# Altium footprint library SamacSys.PcbLib: 1008 footprints (part 19 of 63)
Each footprint in its own frame and in the unit in brackets; x right, y up, seen from the top. Pads: shape width x height; smd on the part's side, far side on the other; paste and mask are expansions set on the pad; w line width, h text height; cw(c..) or ccw(c..) is an arc to the next point about the centre after c.
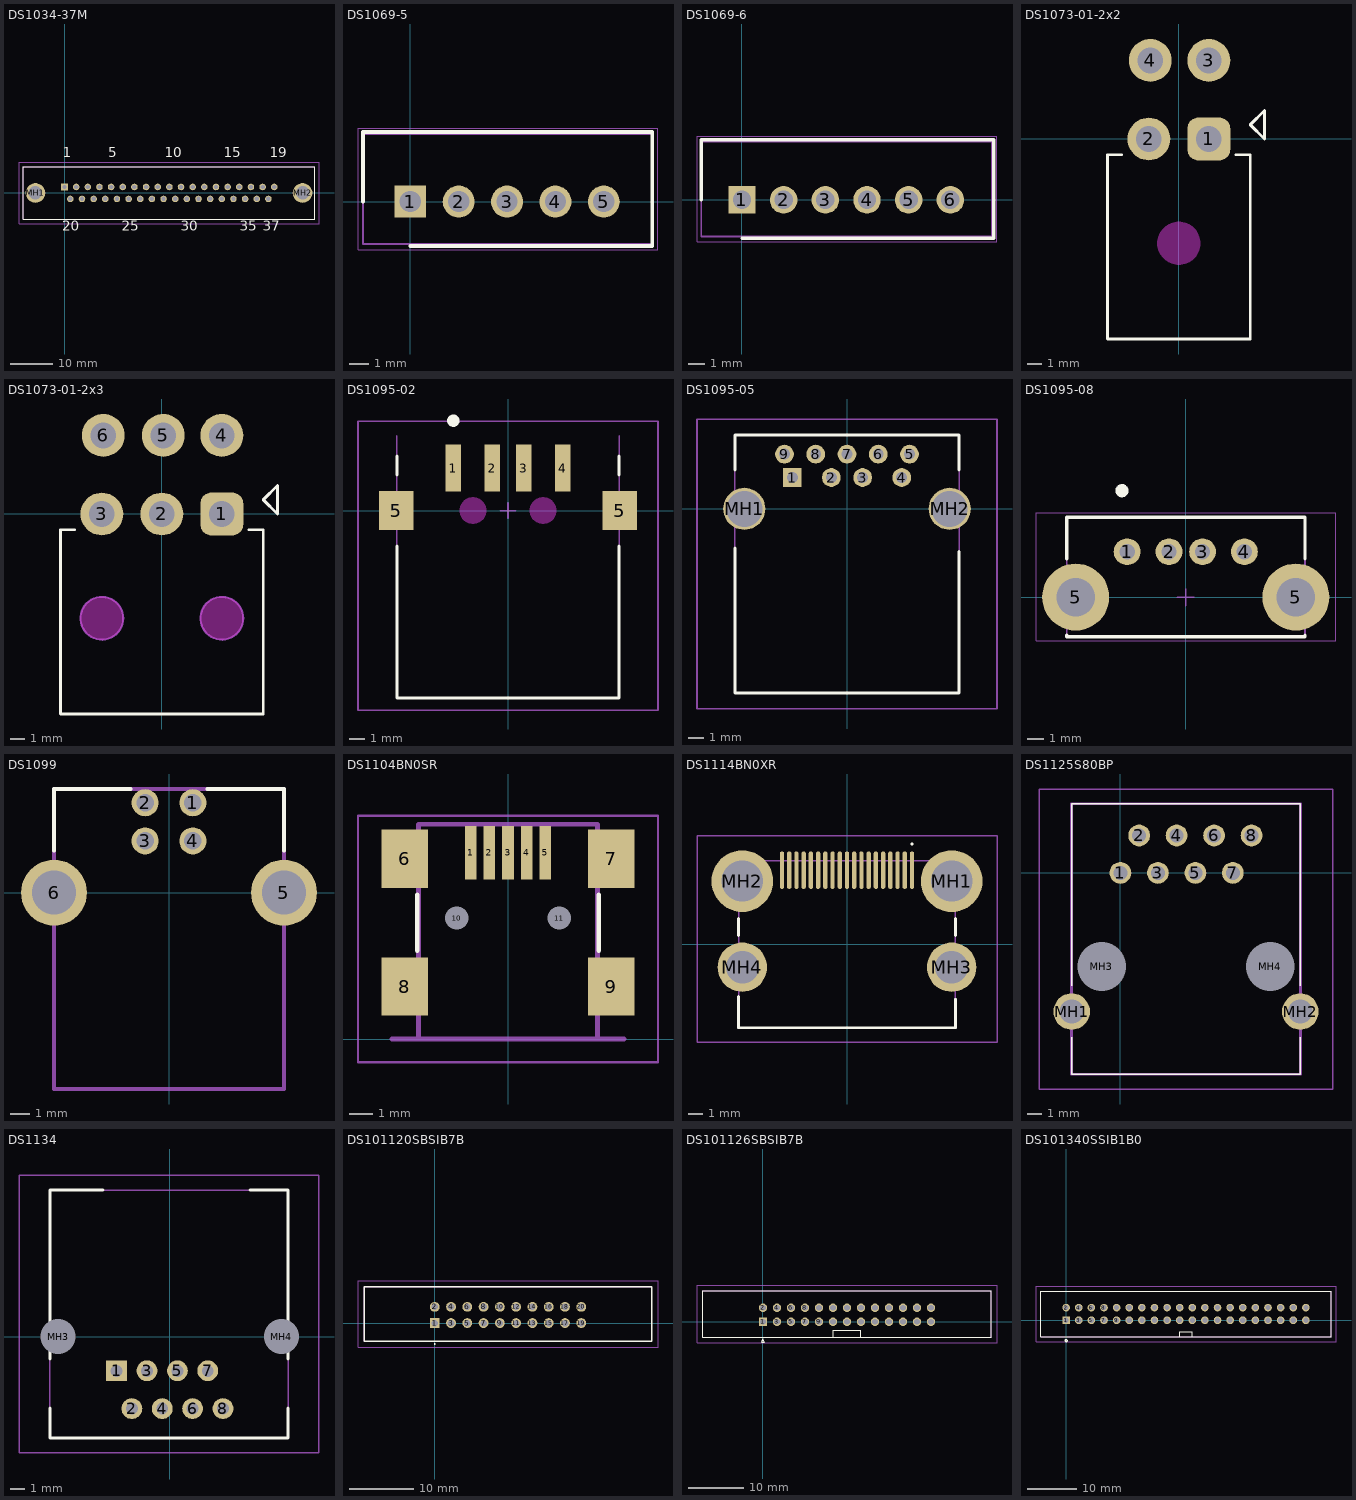
[diagram p18: the footprints below, top view; thin cyan lines are the x and y axes]

## DS1034-37M [mm]
pads (39):
  rect 1.56x1.56 hole 1.04: 1(0,1.425)
  round 1.56 hole 1.04: 2(2.77,1.425) 3(5.54,1.425) 4(8.31,1.425) 5(11.08,1.425) 6(13.85,1.425) 7(16.62,1.425) 8(19.39,1.425) 9(22.16,1.425) 10(24.93,1.425) 11(27.7,1.425) 12(30.47,1.425) 13(33.24,1.425) 14(36.01,1.425) 15(38.78,1.425) 16(41.55,1.425) 17(44.32,1.425) 18(47.09,1.425) 19(49.86,1.425) 20(1.385,-1.415) 21(4.155,-1.415) 22(6.925,-1.415) 23(9.695,-1.415) 24(12.465,-1.415) 25(15.235,-1.415) 26(18.005,-1.415) 27(20.775,-1.415) 28(23.545,-1.415) 29(26.315,-1.415) 30(29.085,-1.415) 31(31.855,-1.415) 32(34.625,-1.415) 33(37.395,-1.415) 34(40.165,-1.415) 35(42.935,-1.415) 36(45.705,-1.415) 37(48.475,-1.415)
  round 4.68 hole 3.2: MH1(-6.91,0.005) MH2(56.59,0.005)
Top Overlay:
  lines w0.2: -9.82,-6.27 -9.82,6.28 59.5,6.28 59.5,-6.27 -9.82,-6.27
  text "35" at 41.696,-9.804 h4
  text "30" at 27.602,-9.804 h4
  text "25" at 13.606,-9.804 h4
  text "20" at -0.489,-9.804 h4
  text "37" at 47.102,-9.804 h4
  text "19" at 48.791,7.696 h4
  text "15" at 37.883,7.696 h4
  text "10" at 23.789,7.696 h4
  text "5" at 10.441,7.696 h4
  text "1" at -0.372,7.696 h4
Assembly:
  lines w0.2: -9.82,-6.27 59.5,-6.27 59.5,6.28 -9.82,6.28 -9.82,-6.27
Countryard:
  lines w0.1: -10.82,-7.27 60.5,-7.27 60.5,7.28 -10.82,7.28 -10.82,-7.27
3D body "5787686-1.stp": height 12.46, standoff -3.44, extent -9.856,-6.294 59.536,6.304

## DS1069-5 [mm]
pads (5):
  rect 1.65x1.65 hole 1.1: 1(0,0)
  round 1.65 hole 1.1: 2(2.5,0) 3(5,0) 4(7.5,0) 5(10,0)
Top Overlay:
  lines w0.2: -2.45,0 -2.45,3.6 12.5,3.6 12.5,-2.3 0,-2.3
Assembly:
  lines w0.1: -2.45,-2.2 -2.45,3.5 12.5,3.5 12.5,-2.2 -2.45,-2.2
Countryard:
  lines w0.05: -2.7,-2.5 -2.7,3.8 12.8,3.8 12.8,-2.5 -2.7,-2.5
3D body "DS1069-5 CWF-5.stp": height 7, standoff -3.5, extent -2.5,-2.2 12.5,3.55

## DS1069-6 [mm]
pads (6):
  rect 1.65x1.65 hole 1.1: 1(0,0)
  round 1.65 hole 1.1: 2(2.5,0) 3(5,0) 4(7.5,0) 5(10,0) 6(12.5,0)
Top Overlay:
  lines w0.2: -2.45,0 -2.45,3.6 15.1,3.6 15.1,-2.3 0,-2.3
Assembly:
  lines w0.1: -2.45,-2.2 15,-2.2 15,3.5 -2.45,3.5 -2.45,-2.2
Countryard:
  lines w0.05: -2.7,-2.5 15.3,-2.5 15.3,3.8 -2.7,3.8 -2.7,-2.5
3D body "DS1069-6 CWF-6.stp": height 7, standoff -3.5, extent -2.5,-2.2 15,3.55

## DS1073-01-2x2 [mm] "Molex Mini-FIT, P=4.2mm"
pads (4):
  rrect50% 3x3 hole 1.8: 1(2.1,0)
  round 3 hole 1.8: 2(-2.1,0) 3(2.1,5.5) 4(-2,5.5)
Top Overlay:
  lines w0.2: -4,-1.1 -5,-1.1 -5,-14 5,-14 5,-1.1 4,-1.1 ; 5,1 6,0 6,2 5,1
Keep-Out Layer:
  board cut-out: -1.5,-7.3 -1.5,-7.448 -1.442,-7.738 -1.329,-8.011 -1.165,-8.256 -0.956,-8.465 -0.711,-8.629 -0.438,-8.742 -0.148,-8.8 0,-8.8 0.148,-8.8 0.438,-8.742 0.711,-8.629 0.956,-8.465 1.165,-8.256 1.329,-8.011 1.442,-7.738 1.5,-7.448 1.5,-7.3 1.5,-7.152 1.442,-6.862 1.329,-6.589 1.165,-6.344 0.956,-6.135 0.711,-5.971 0.438,-5.858 0.148,-5.8 0,-5.8 -0.148,-5.8 -0.438,-5.858 -0.711,-5.971 -0.956,-6.135 -1.165,-6.344 -1.329,-6.589 -1.442,-6.862 -1.5,-7.152
3D body "2206030104.stp": height 11.15, standoff -3.8, extent -4.804,-13.9 4.804,6.054

## DS1073-01-2x3 [mm] "Molex Mini-FIT, P=4.2mm"
pads (6):
  rrect50% 3x3 hole 1.8: 1(4.2,0)
  round 3 hole 1.8: 2(0,0) 3(-4.2,0) 4(4.2,5.5) 5(0.1,5.5) 6(-4.1,5.5)
Top Overlay:
  lines w0.2: -6.1,-1.1 -7.1,-1.1 -7.1,-14 7.1,-14 7.1,-1.1 6.1,-1.1 ; 7.1,1 8.1,0 8.1,2 7.1,1
Keep-Out Layer:
  board cut-out: -5.7,-7.3 -5.7,-7.448 -5.642,-7.738 -5.529,-8.011 -5.365,-8.256 -5.156,-8.465 -4.911,-8.629 -4.638,-8.742 -4.348,-8.8 -4.2,-8.8 -4.052,-8.8 -3.762,-8.742 -3.489,-8.629 -3.244,-8.465 -3.035,-8.256 -2.871,-8.011 -2.758,-7.738 -2.7,-7.448 -2.7,-7.3 -2.7,-7.152 -2.758,-6.862 -2.871,-6.589 -3.035,-6.344 -3.244,-6.135 -3.489,-5.971 -3.762,-5.858 -4.052,-5.8 -4.2,-5.8 -4.348,-5.8 -4.638,-5.858 -4.911,-5.971 -5.156,-6.135 -5.365,-6.344 -5.529,-6.589 -5.642,-6.862 -5.7,-7.152
  board cut-out: 2.7,-7.3 2.7,-7.448 2.758,-7.738 2.871,-8.011 3.035,-8.256 3.244,-8.465 3.489,-8.629 3.762,-8.742 4.052,-8.8 4.2,-8.8 4.348,-8.8 4.638,-8.742 4.911,-8.629 5.156,-8.465 5.365,-8.256 5.529,-8.011 5.642,-7.738 5.7,-7.448 5.7,-7.3 5.7,-7.152 5.642,-6.862 5.529,-6.589 5.365,-6.344 5.156,-6.135 4.911,-5.971 4.638,-5.858 4.348,-5.8 4.2,-5.8 4.052,-5.8 3.762,-5.858 3.489,-5.971 3.244,-6.135 3.035,-6.344 2.871,-6.589 2.758,-6.862 2.7,-7.152
Top Assembly:
  circle w0.15: c4.2,-7.3 r1.5
  circle w0.15: c-4.2,-7.3 r1.5
3D body "2206030106.stp": height 11.15, standoff -3.8, extent -6.904,-13.9 6.904,6.054

## DS1095-02 [mm]
height 7.1
pads (6):
  rect 1x3 smd: 1(-3.5,2.71) 2(-1,2.71) 3(1,2.71) 4(3.5,2.71)
  rect 2.2x2.5 smd: 5(-7.15,0) 5(7.15,0)
Top Overlay:
  circle w0.4: c-3.5,5.75 r0.193
  lines w0.2: -7.112,-2.261 -7.112,-12 7.112,-12 7.112,-2.261 ; -7.112,2.286 -7.112,3.5 ; 7.112,2.286 7.112,3.5
Keep-Out Layer:
  board cut-out: -2.25,-0.85 -2.334,-0.85 -2.498,-0.817 -2.653,-0.753 -2.792,-0.66 -2.91,-0.542 -3.003,-0.403 -3.067,-0.248 -3.1,-0.084 -3.1,0 -3.1,0.084 -3.067,0.248 -3.003,0.403 -2.91,0.542 -2.792,0.66 -2.653,0.753 -2.498,0.817 -2.334,0.85 -2.25,0.85 -2.166,0.85 -2.002,0.817 -1.847,0.753 -1.708,0.66 -1.59,0.542 -1.497,0.403 -1.433,0.248 -1.4,0.084 -1.4,0 -1.4,-0.084 -1.433,-0.248 -1.497,-0.403 -1.59,-0.542 -1.708,-0.66 -1.847,-0.753 -2.002,-0.817 -2.166,-0.85
  board cut-out: 2.25,0.85 2.334,0.85 2.498,0.817 2.653,0.753 2.792,0.66 2.91,0.542 3.003,0.403 3.067,0.248 3.1,0.084 3.1,0 3.1,-0.084 3.067,-0.248 3.003,-0.403 2.91,-0.542 2.792,-0.66 2.653,-0.753 2.498,-0.817 2.334,-0.85 2.25,-0.85 2.166,-0.85 2.002,-0.817 1.847,-0.753 1.708,-0.66 1.59,-0.542 1.497,-0.403 1.433,-0.248 1.4,-0.084 1.4,0 1.4,0.084 1.433,0.248 1.497,0.403 1.59,0.542 1.708,0.66 1.847,0.753 2.002,0.817 2.166,0.85
Assembly:
  lines w0.1: -7.112,4.775 -7.112,-12 7.112,-12 7.112,4.775
Countryard:
  lines w0.1: -0.5,0 0.5,0 ; 0,-0.5 0,0.5 ; -9.595,-12.78 -9.595,5.72 9.595,5.72 9.595,-12.78 -9.595,-12.78

## DS1095-05 [mm]
height 7.1
pads (11):
  rect 1.2x1.2 hole 0.7: 1(-3.5,2)
  round 1.2 hole 0.7: 2(-1,2) 3(1,2) 4(3.5,2) 5(4,3.5) 6(2,3.5) 7(0,3.5) 8(-2,3.5) 9(-4,3.5)
  round 2.7 hole 2.3: MH1(-6.57,0) MH2(6.57,0)
Top Overlay:
  lines w0.2: -7.175,-2.5 -7.175,-11.78 7.175,-11.78 7.175,-2.75 ; -7.175,2.5 -7.175,4.72 7.175,4.72 7.175,2.5
Assembly:
  lines w0.1: -7.175,-11.78 7.175,-11.78 7.175,4.72 -7.175,4.72 -7.175,-11.78
Countryard:
  lines w0.1: -9.595,-12.78 9.595,-12.78 9.595,5.72 -9.595,5.72 -9.595,-12.78
3D body "484050003.stp": height 7.57, standoff -4.04, extent -7.8,-11.8 7.8,4.7

## DS1095-08 [mm] "USB 2.0 Vertical"
height 13.7
pads (6):
  round 1.6 hole 0.92: 1(-3.5,2.71) 2(-1,2.71) 3(1,2.71) 4(3.5,2.71)
  round 4 hole 2.3: 5(-6.57,0) 5(6.57,0)
Top Overlay:
  circle w0.4: c-3.81,6.35 r0.193
  lines w0.2: -7.112,-2.261 -7.112,-2.362 7.112,-2.362 7.112,-2.261 ; -7.112,2.286 -7.112,4.775 7.112,4.775 7.112,2.286
Assembly:
  lines w0.1: -7.112,-2.362 -7.112,4.775 7.112,4.775 7.112,-2.362 -7.112,-2.362
Countryard:
  lines w0.05: -8.941,-2.591 8.966,-2.591 8.966,5.029 -8.941,5.029 -8.941,-2.591
  lines w0.1: -0.5,0 0.5,0 ; 0,-0.5 0,0.5
3D body "usb1040-xx-l-b_revb.step": height 13.75, standoff -3.45, extent -7.798,-2.341 7.802,4.779

## DS1099 [mm] "USB Type B"
height 11
pads (6):
  round 1.42 hole 0.92: 1(1.25,4.71) 2(-1.25,4.71) 3(-1.25,2.71) 4(1.25,2.71)
  round 3.45 hole 2.3: 5(6.02,0) 6(-6.02,0)
Top Overlay:
  lines w0.2: -6.02,2.2 -6.02,5.43 -2,5.43 ; 2,5.43 6.02,5.43 6.02,2.2
Assembly:
  lines w0.2: -6.02,-10.28 6.02,-10.28 6.02,5.43 -6.02,5.43 -6.02,-10.28
3D body "292304-1.stp": height 11.53, standoff -3.89, extent -7.195,-10.27 7.195,5.43

## DS1104BN0SR [mm]
pads (11):
  rect 0.5x2.3 smd: 1(-1.6,8) 2(-0.8,8) 3(0,8) 4(0.8,8) 5(1.6,8)
  rect 2x2.5 smd: 6(-4.45,7.75) 7(4.45,7.75) 8(-4.45,2.25) 9(4.45,2.25)
  round 0.5 hole 1 unplated: 10(-2.2,5.2) 11(2.2,5.2)
Top Overlay:
  lines w0.2: -3.9,3.8 -3.9,6.2 ; 3.9,3.8 3.9,6.2
Assembly:
  lines w0.2: -5,0 5,0 ; -3.85,0 -3.85,9.23 3.85,9.23 3.85,0
  text "PCB_Edge" at -4.367,-2.5 h3
Countryard:
  lines w0.1: -6.45,-1 -6.45,9.6 6.45,9.6 6.45,-1 -6.45,-1
3D body "DS1104-BN0SRS.stp": height 3.95, standoff -0.52, extent -4.65,-0.7 4.65,8.5

## DS1114BN0XR [mm]
pads (23):
  rrect100% 0.3x2.6 smd: 1(4.5,5.135) 2(4,5.135) 3(3.5,5.135) 4(3,5.135) 5(2.5,5.135) 6(2,5.135) 7(1.5,5.135) 8(1,5.135) 9(0.5,5.135) 10(0,5.135) 11(-0.5,5.135) 12(-1,5.135) 13(-1.5,5.135) 14(-2,5.135) 15(-2.5,5.135) 16(-3,5.135) 17(-3.5,5.135) 18(-4,5.135) 19(-4.5,5.135)
  round 4.275 hole 2.85: MH1(7.25,4.375) MH2(-7.25,4.375)
  round 3.42 hole 2.28: MH3(7.25,-1.585) MH4(-7.25,-1.585)
Top Overlay:
  lines w0.1: 4.5,6.9 cw(c4.5,6.95) 4.5,7 cw(c4.5,6.95) 4.5,6.9
  lines w0.2: -7.5,-3.6 -7.5,-5.775 7.5,-5.775 7.5,-3.8 ; -7.5,0.6 -7.5,1.8 ; 7.5,0.6 7.5,1.8
Assembly:
  lines w0.1: -7.5,-5.775 -7.5,5.775 7.5,5.775 7.5,-5.775 -7.5,-5.775
Countryard:
  lines w0.1: -10.387,-6.775 -10.387,7.513 ; -10.387,-6.775 10.387,-6.775 ; -10.387,-6.775 -10.387,7.513 ; -10.387,-6.775 10.387,-6.775 ; -10.387,7.513 10.387,7.513 ; -10.387,7.513 10.387,7.513 ; 10.387,-6.775 10.387,7.513 ; 10.387,-6.775 10.387,7.513
3D body "c-1747981-1-l-3d.stp": height 6.18, standoff -2.1, extent -7.5,-5.7 7.5,6.3

## DS1125S80BP [mm]
pads (12):
  round 1.478 hole 0.95: 1(0,0) 2(1.27,2.54) 3(2.54,0) 4(3.81,2.54) 5(5.08,0) 6(6.35,2.54) 7(7.62,0) 8(8.89,2.54)
  round 2.475 hole 1.65: MH1(-3.305,-9.4) MH2(12.195,-9.4)
  round 1.65 hole 3.3 unplated: MH3(-1.27,-6.35) MH4(10.16,-6.35)
Top Overlay:
  lines w0.1: -3.305,-11.15 -3.305,-13.65 12.195,-13.65 12.195,-11.15 ; -3.305,-7.65 -3.305,4.69 12.195,4.69 12.195,-7.65
Assembly:
  lines w0.2: -3.305,-13.65 12.195,-13.65 12.195,4.69 -3.305,4.69 -3.305,-13.65
Countryard:
  lines w0.1: -5.505,-14.65 14.395,-14.65 14.395,5.69 -5.505,5.69 -5.505,-14.65
3D body "DS1125-S80BP.stp": height 12.68, standoff -5, extent -4.024,-13.65 12.92,4.69

## DS1134 [mm] "TJ8P8C (DS1134)"
pads (10):
  rect 1.4x1.4 hole 0.8: 1(-3.57,-2.3)
  round 1.4 hole 0.8: 2(-2.55,-4.84) 3(-1.53,-2.3) 4(-0.51,-4.84) 5(0.51,-2.3) 6(1.53,-4.84) 7(2.55,-2.3) 8(3.57,-4.84)
  round 1.585 hole 2.36 unplated: MH3(-7.5,0) MH4(7.5,0)
Top Overlay:
  lines w0.2: -8.055,-4.8 -8.055,-6.81 7.945,-6.81 7.945,-4.8 ; -8.055,-1.5 -8.055,9.84 -4.5,9.84 ; 5.4,9.84 7.945,9.84 7.945,-1.5
Assembly:
  lines w0.1: -8.055,-6.81 -8.055,9.84 7.945,9.84 7.945,-6.81 -8.055,-6.81
Countryard:
  lines w0.1: -10.13,-7.81 -10.13,10.84 10.02,10.84 10.02,-7.81 -10.13,-7.81

## DS101120SBSIB7B [mm]
pads (20):
  rect 1.53x1.53 hole 1.02: 1(0,0)
  round 1.53 hole 1.02: 2(0,2.54) 3(2.54,0) 4(2.54,2.54) 5(5.08,0) 6(5.08,2.54) 7(7.62,0) 8(7.62,2.54) 9(10.16,0) 10(10.16,2.54) 11(12.7,0) 12(12.7,2.54) 13(15.24,0) 14(15.24,2.54) 15(17.78,0) 16(17.78,2.54) 17(20.32,0) 18(20.32,2.54) 19(22.86,0) 20(22.86,2.54)
Top Overlay:
  lines w0.1: 0,-3.3 ccw(c0,-3.25) 0,-3.2 ccw(c0,-3.25) 0,-3.3
  lines w0.2: -10.97,-2.805 -10.97,5.645 33.83,5.645 33.83,-2.805 -10.97,-2.805
Assembly:
  lines w0.1: -10.97,-2.805 -10.97,5.645 33.83,5.645 33.83,-2.805 -10.97,-2.805
Countryard:
  lines w0.1: -11.97,-3.805 -11.97,6.645 34.83,6.645 34.83,-3.805 -11.97,-3.805
3D body "User Library-DS1011-20SBSIB7-B.step": height 28, standoff -3.1, extent -10.9,-2.75 33.9,5.6

## DS101126SBSIB7B [mm]
pads (26):
  rect 1.53x1.53 hole 1.02: 1(0,0)
  round 1.53 hole 1.02: 2(0,2.54) 3(2.54,0) 4(2.54,2.54) 5(5.08,0) 6(5.08,2.54) 7(7.62,0) 8(7.62,2.54) 9(10.16,0) 10(10.16,2.54) 11(12.7,0) 12(12.7,2.54) 13(15.24,0) 14(15.24,2.54) 15(17.78,0) 16(17.78,2.54) 17(20.32,0) 18(20.32,2.54) 19(22.86,0) 20(22.86,2.54) 21(25.4,0) 22(25.4,2.54) 23(27.94,0) 24(27.94,2.54) 25(30.48,0) 26(30.48,2.54)
Top Overlay:
  lines w0.1: 0,-3.3 ccw(c0,-3.25) 0,-3.2 ccw(c0,-3.25) 0,-3.3
  lines w0.2: 0.1,-3.5 -0.2,-3.7 ; 12.75,-2.75 12.75,-1.5 17.75,-1.5 17.75,-2.75 ; -0.2,-3.7 0,-3.2 0.2,-3.7 -0.2,-3.7 ; -10.97,-2.805 -10.97,5.645 41.45,5.645 41.45,-2.805 -10.97,-2.805
Assembly:
  lines w0.1: -10.97,-2.805 41.45,-2.805 41.45,5.645 -10.97,5.645 -10.97,-2.805
Countryard:
  lines w0.1: -11.97,-3.805 -11.97,6.645 42.45,6.645 42.45,-3.805 -11.97,-3.805
3D body "71918_y26_asm.stp": height 26.79, standoff -3.19, extent -10.918,-2.676 41.402,5.724

## DS101340SSIB1B0 [mm]
pads (40):
  rect 1.53x1.53 hole 1.02: 1(0,0)
  round 1.53 hole 1.02: 2(0,2.54) 3(2.54,0) 4(2.54,2.54) 5(5.08,0) 6(5.08,2.54) 7(7.62,0) 8(7.62,2.54) 9(10.16,0) 10(10.16,2.54) 11(12.7,0) 12(12.7,2.54) 13(15.24,0) 14(15.24,2.54) 15(17.78,0) 16(17.78,2.54) 17(20.32,0) 18(20.32,2.54) 19(22.86,0) 20(22.86,2.54) 21(25.4,0) 22(25.4,2.54) 23(27.94,0) 24(27.94,2.54) 25(30.48,0) 26(30.48,2.54) 27(33.02,0) 28(33.02,2.54) 29(35.56,0) 30(35.56,2.54) 31(38.1,0) 32(38.1,2.54) 33(40.64,0) 34(40.64,2.54) 35(43.18,0) 36(43.18,2.54) 37(45.72,0) 38(45.72,2.54) 39(48.26,0) 40(48.26,2.54)
Top Overlay:
  lines w0.2: 22.86,-3.302 22.86,-2.286 25.4,-2.286 25.4,-3.302 ; -5.07,-3.28 53.33,-3.28 53.33,5.82 -5.07,5.82 -5.07,-3.28
  lines w0.3: 0,-4.304 cw(c0,-4.104) 0,-3.904 cw(c0,-4.104) 0,-4.304
Assembly:
  lines w0.1: -5.07,-3.28 53.33,-3.28 53.33,5.82 -5.07,5.82 -5.07,-3.28
Countryard:
  lines w0.1: -6.07,-4.28 54.33,-4.28 54.33,6.82 -6.07,6.82 -6.07,-4.28
3D body "BH-40.STEP": height 8.9, standoff -3.5, extent -5.08,-3.158 53.32,5.842